# Altium schematic symbol library Schlib2.SchLib: 1 symbol
Pins are listed as number, name and electrical type; pins without a type are passive.

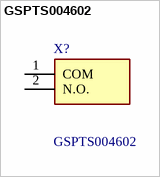
[diagram p0: symbol GSPTS004602]

## GSPTS004602
designator X?
Tactile Switch SPST-NO Top Actuated Surface Mount 0.05A,12VDC ,-40C ~ 90C,"PTS636SK25FSMTR LFS"; Manufacturer_Name: C & K COMPONENTS; Geometry.Height: 2.7mm; TTI Part Number: *; TTI Price/Stock: *; Manufacturer_Part_Number: GSPTS004602; Datasheet Link: https://www.ckswitches.com/media/2779/pts636.pdf
footprint GSPTS004602
pins: 1 COM, 2 N.O.